# Altium footprint library Connector Header 254.PcbLib: 156 footprints (part 9 of 11)
Each footprint in its own frame and in the unit in brackets; x right, y up, seen from the top. Pads: shape width x height; smd on the part's side, far side on the other; paste and mask are expansions set on the pad; w line width, h text height; cw(c..) or ccw(c..) is an arc to the next point about the centre after c.
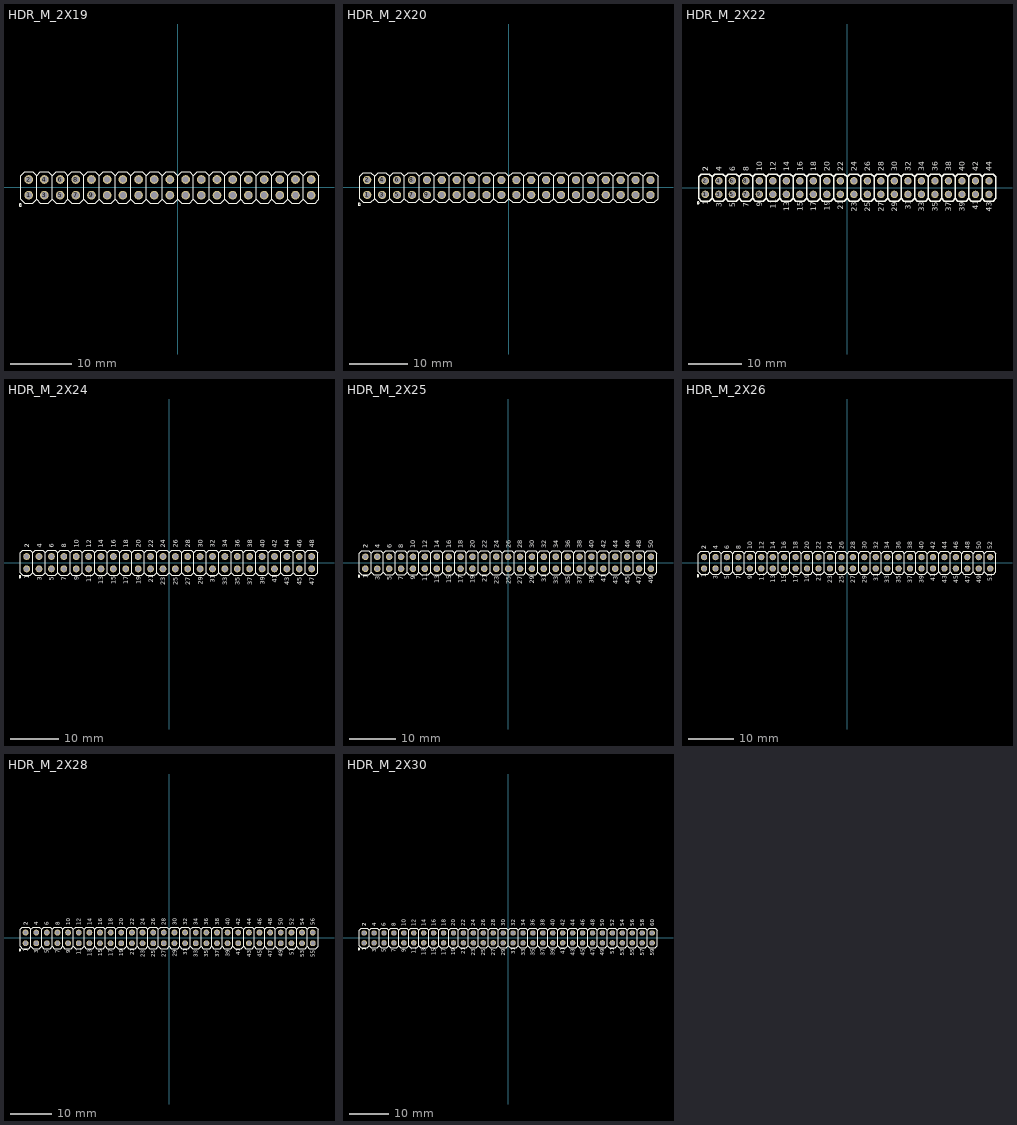
[diagram p8: the footprints below, top view; thin cyan lines are the x and y axes]

## HDR_M_2X19 [mm] "Connector; Header; 19x2 Position"
height 7.5
pads (38):
  round 1.4 / inner round 1.4 / far side oval 1.4x2.2 hole 1: 1(-24.13,-1.27) 2(-24.13,1.27) 3(-21.59,-1.27) 4(-21.59,1.27) 5(-19.05,-1.27) 6(-19.05,1.27) 7(-16.51,-1.27) 8(-16.51,1.27) 9(-13.97,-1.27) 10(-13.97,1.27) 11(-11.43,-1.27) 12(-11.43,1.27) 13(-8.89,-1.27) 14(-8.89,1.27) 15(-6.35,-1.27) 16(-6.35,1.27) 17(-3.81,-1.27) 18(-3.81,1.27) 19(-1.27,-1.27) 20(-1.27,1.27) 21(1.27,-1.27) 22(1.27,1.27) 23(3.81,-1.27) 24(3.81,1.27) 25(6.35,-1.27) 26(6.35,1.27) 27(8.89,-1.27) 28(8.89,1.27) 29(11.43,-1.27) 30(11.43,1.27) 31(13.97,-1.27) 32(13.97,1.27) 33(16.51,-1.27) 34(16.51,1.27) 35(19.05,-1.27) 36(19.05,1.27) 37(21.59,-1.27) 38(21.59,1.27)
TopOverlay:
  drawing of 173 lines, arcs and shapes, not listed
3D body "PLD-38.step": height 8.5, standoff -2.9, extent -25.4,-2.5 22.86,2.5

## HDR_M_2X20 [mm] "Connector; Header; 20x2 Position"
height 7.5
pads (40):
  round 1.4 / inner round 1.4 / far side oval 1.4x2.2 hole 1: 1(-24.13,-1.27) 2(-24.13,1.27) 3(-21.59,-1.27) 4(-21.59,1.27) 5(-19.05,-1.27) 6(-19.05,1.27) 7(-16.51,-1.27) 8(-16.51,1.27) 9(-13.97,-1.27) 10(-13.97,1.27) 11(-11.43,-1.27) 12(-11.43,1.27) 13(-8.89,-1.27) 14(-8.89,1.27) 15(-6.35,-1.27) 16(-6.35,1.27) 17(-3.81,-1.27) 18(-3.81,1.27) 19(-1.27,-1.27) 20(-1.27,1.27) 21(1.27,-1.27) 22(1.27,1.27) 23(3.81,-1.27) 24(3.81,1.27) 25(6.35,-1.27) 26(6.35,1.27) 27(8.89,-1.27) 28(8.89,1.27) 29(11.43,-1.27) 30(11.43,1.27) 31(13.97,-1.27) 32(13.97,1.27) 33(16.51,-1.27) 34(16.51,1.27) 35(19.05,-1.27) 36(19.05,1.27) 37(21.59,-1.27) 38(21.59,1.27) 39(24.13,-1.27) 40(24.13,1.27)
TopOverlay:
  drawing of 182 lines, arcs and shapes, not listed
3D body "PLD-40.step": height 8.4, standoff -3, extent -25.4,-2.5 25.4,2.5

## HDR_M_2X22 [mm] "Male Header 2X22 with 2.54 mm Pitch"
pads (44):
  round 1.4 / inner round 1.4 / far side oval 1.4x2.2 hole 1: 1(-26.67,-1.27) 2(-26.67,1.27) 3(-24.13,-1.27) 4(-24.13,1.27) 5(-21.59,-1.27) 6(-21.59,1.27) 7(-19.05,-1.27) 8(-19.05,1.27) 9(-16.51,-1.27) 10(-16.51,1.27) 11(-13.97,-1.27) 12(-13.97,1.27) 13(-11.43,-1.27) 14(-11.43,1.27) 15(-8.89,-1.27) 16(-8.89,1.27) 17(-6.35,-1.27) 18(-6.35,1.27) 19(-3.81,-1.27) 20(-3.81,1.27) 21(-1.27,-1.27) 22(-1.27,1.27) 23(1.27,-1.27) 24(1.27,1.27) 25(3.81,-1.27) 26(3.81,1.27) 27(6.35,-1.27) 28(6.35,1.27) 29(8.89,-1.27) 30(8.89,1.27) 31(11.43,-1.27) 32(11.43,1.27) 33(13.97,-1.27) 34(13.97,1.27) 35(16.51,-1.27) 36(16.51,1.27) 37(19.05,-1.27) 38(19.05,1.27) 39(21.59,-1.27) 40(21.59,1.27) 41(24.13,-1.27) 42(24.13,1.27) 43(26.67,-1.27) 44(26.67,1.27)
TopOverlay:
  drawing of 156 lines, arcs and shapes, not listed
  text "1" at -26.162,-3.253 h1
  text "2" at -26.162,3.048 h1
  text "2" at -26.162,3.048 h1
  text "1" at -26.162,-3.253 h1
  text "4" at -23.622,3.048 h1
  text "3" at -23.622,-3.682 h1
  text "6" at -21.082,3.048 h1
  text "5" at -21.082,-3.682 h1
  text "8" at -18.542,3.048 h1
  text "7" at -18.542,-3.682 h1
  text "10" at -16.002,3.048 h1
  text "9" at -16.002,-3.634 h1
  text "12" at -13.462,3.048 h1
  text "11" at -13.462,-3.986 h1
  text "14" at -10.922,3.048 h1
  text "13" at -10.922,-4.415 h1
  text "16" at -8.382,3.048 h1
  text "15" at -8.382,-4.415 h1
  text "18" at -5.842,3.048 h1
  text "17" at -5.842,-4.415 h1
  text "20" at -3.302,3.048 h1
  text "19" at -3.302,-4.367 h1
  text "22" at -0.762,3.048 h1
  text "21" at -0.762,-4.144 h1
  text "24" at 1.778,3.048 h1
  text "23" at 1.778,-4.572 h1
  text "26" at 4.318,3.048 h1
  text "25" at 4.318,-4.572 h1
  text "28" at 6.858,3.048 h1
  text "27" at 6.858,-4.572 h1
  text "30" at 9.398,3.048 h1
  text "29" at 9.398,-4.524 h1
  text "32" at 11.938,3.048 h1
  text "31" at 11.938,-4.144 h1
  text "34" at 14.478,3.048 h1
  text "33" at 14.478,-4.572 h1
  text "36" at 17.018,3.048 h1
  text "35" at 17.018,-4.572 h1
  text "38" at 19.558,3.048 h1
  text "37" at 19.558,-4.572 h1
  text "40" at 22.098,3.048 h1
  text "39" at 22.098,-4.524 h1
  text "42" at 24.638,3.048 h1
  text "41" at 24.638,-4.144 h1
  text "44" at 27.178,3.048 h1
  text "43" at 27.178,-4.572 h1
3D body "PIN.STEP": height 8.43, standoff -2.49, extent -27.94,-2.54 -25.4,0
3D body "PIN_mid.STEP": height 8.43, standoff -2.49, extent -22.86,0 -20.32,2.54
3D body "PIN_mid.STEP": height 8.43, standoff -2.49, extent -20.32,0 -17.78,2.54
3D body "PIN_mid.STEP": height 8.43, standoff -2.49, extent -17.78,0 -15.24,2.54
3D body "PIN_mid.STEP": height 8.43, standoff -2.49, extent -15.24,0 -12.7,2.54
3D body "PIN_mid.STEP": height 8.43, standoff -2.49, extent -12.7,0 -10.16,2.54
3D body "PIN_mid.STEP": height 8.43, standoff -2.49, extent -10.16,0 -7.62,2.54
3D body "PIN_mid.STEP": height 8.43, standoff -2.49, extent -7.62,0 -5.08,2.54
3D body "PIN_mid.STEP": height 8.43, standoff -2.49, extent -5.08,0 -2.54,2.54
3D body "PIN_mid.STEP": height 8.43, standoff -2.49, extent -2.54,0 0,2.54
3D body "PIN_mid.STEP": height 8.43, standoff -2.49, extent 0,0 2.54,2.54
3D body "PIN_mid.STEP": height 8.43, standoff -2.49, extent 2.54,0 5.08,2.54
3D body "PIN_mid.STEP": height 8.43, standoff -2.49, extent 5.08,0 7.62,2.54
3D body "PIN_mid.STEP": height 8.43, standoff -2.49, extent 7.62,0 10.16,2.54
3D body "PIN_mid.STEP": height 8.43, standoff -2.49, extent 10.16,0 12.7,2.54
3D body "PIN_mid.STEP": height 8.43, standoff -2.49, extent 12.7,0 15.24,2.54
3D body "PIN_mid.STEP": height 8.43, standoff -2.49, extent 15.24,0 17.78,2.54
3D body "PIN_mid.STEP": height 8.43, standoff -2.49, extent 17.78,0 20.32,2.54
3D body "PIN_mid.STEP": height 8.43, standoff -2.49, extent 20.32,0 22.86,2.54
3D body "PIN_mid.STEP": height 8.43, standoff -2.49, extent 22.86,0 25.4,2.54
3D body "PIN_mid.STEP": height 8.43, standoff -2.49, extent -25.4,0 -22.86,2.54
3D body "PIN_mid.STEP": height 8.43, standoff -2.49, extent -25.4,-2.54 -22.86,0
3D body "PIN_mid.STEP": height 8.43, standoff -2.49, extent -22.86,-2.54 -20.32,0
3D body "PIN_mid.STEP": height 8.43, standoff -2.49, extent -20.32,-2.54 -17.78,0
3D body "PIN_mid.STEP": height 8.43, standoff -2.49, extent -17.78,-2.54 -15.24,0
3D body "PIN_mid.STEP": height 8.43, standoff -2.49, extent -15.24,-2.54 -12.7,0
3D body "PIN_mid.STEP": height 8.43, standoff -2.49, extent -12.7,-2.54 -10.16,0
3D body "PIN_mid.STEP": height 8.43, standoff -2.49, extent -10.16,-2.54 -7.62,0
3D body "PIN_mid.STEP": height 8.43, standoff -2.49, extent -7.62,-2.54 -5.08,0
3D body "PIN_mid.STEP": height 8.43, standoff -2.49, extent -5.08,-2.54 -2.54,0
3D body "PIN_mid.STEP": height 8.43, standoff -2.49, extent -2.54,-2.54 0,0
3D body "PIN_mid.STEP": height 8.43, standoff -2.49, extent 0,-2.54 2.54,0
3D body "PIN_mid.STEP": height 8.43, standoff -2.49, extent 2.54,-2.54 5.08,0
3D body "PIN_mid.STEP": height 8.43, standoff -2.49, extent 5.08,-2.54 7.62,0
3D body "PIN_mid.STEP": height 8.43, standoff -2.49, extent 7.62,-2.54 10.16,0
3D body "PIN_mid.STEP": height 8.43, standoff -2.49, extent 10.16,-2.54 12.7,0
3D body "PIN_mid.STEP": height 8.43, standoff -2.49, extent 12.7,-2.54 15.24,0
3D body "PIN_mid.STEP": height 8.43, standoff -2.49, extent 15.24,-2.54 17.78,0
3D body "PIN_mid.STEP": height 8.43, standoff -2.49, extent 17.78,-2.54 20.32,0
3D body "PIN_mid.STEP": height 8.43, standoff -2.49, extent 20.32,-2.54 22.86,0
3D body "PIN_mid.STEP": height 8.43, standoff -2.49, extent 22.86,-2.54 25.4,0
3D body "PIN.STEP": height 8.43, standoff -2.49, extent -27.94,0 -25.4,2.54
3D body "PIN.STEP": height 8.43, standoff -2.49, extent 25.4,0 27.94,2.54
3D body "PIN.STEP": height 8.43, standoff -2.49, extent 25.4,-2.54 27.94,0

## HDR_M_2X24 [mm] "Male Header 2X24 with 2.54 mm Pitch"
pads (48):
  round 1.4 / inner round 1.4 / far side oval 1.4x2.2 hole 1: 1(-29.21,-1.27) 2(-29.21,1.27) 3(-26.67,-1.27) 4(-26.67,1.27) 5(-24.13,-1.27) 6(-24.13,1.27) 7(-21.59,-1.27) 8(-21.59,1.27) 9(-19.05,-1.27) 10(-19.05,1.27) 11(-16.51,-1.27) 12(-16.51,1.27) 13(-13.97,-1.27) 14(-13.97,1.27) 15(-11.43,-1.27) 16(-11.43,1.27) 17(-8.89,-1.27) 18(-8.89,1.27) 19(-6.35,-1.27) 20(-6.35,1.27) 21(-3.81,-1.27) 22(-3.81,1.27) 23(-1.27,-1.27) 24(-1.27,1.27) 25(1.27,-1.27) 26(1.27,1.27) 27(3.81,-1.27) 28(3.81,1.27) 29(6.35,-1.27) 30(6.35,1.27) 31(8.89,-1.27) 32(8.89,1.27) 33(11.43,-1.27) 34(11.43,1.27) 35(13.97,-1.27) 36(13.97,1.27) 37(16.51,-1.27) 38(16.51,1.27) 39(19.05,-1.27) 40(19.05,1.27) 41(21.59,-1.27) 42(21.59,1.27) 43(24.13,-1.27) 44(24.13,1.27) 45(26.67,-1.27) 46(26.67,1.27) 47(29.21,-1.27) 48(29.21,1.27)
TopOverlay:
  drawing of 170 lines, arcs and shapes, not listed
  text "47" at 29.718,-4.572 h1
  text "48" at 29.718,3.048 h1
  text "45" at 27.178,-4.572 h1
  text "46" at 27.178,3.048 h1
  text "43" at 24.638,-4.572 h1
  text "44" at 24.638,3.048 h1
  text "41" at 22.098,-4.144 h1
  text "42" at 22.098,3.048 h1
  text "39" at 19.558,-4.524 h1
  text "40" at 19.558,3.048 h1
  text "37" at 17.018,-4.572 h1
  text "38" at 17.018,3.048 h1
  text "35" at 14.478,-4.572 h1
  text "36" at 14.478,3.048 h1
  text "33" at 11.938,-4.572 h1
  text "34" at 11.938,3.048 h1
  text "31" at 9.398,-4.144 h1
  text "32" at 9.398,3.048 h1
  text "29" at 6.858,-4.524 h1
  text "30" at 6.858,3.048 h1
  text "27" at 4.318,-4.572 h1
  text "28" at 4.318,3.048 h1
  text "25" at 1.778,-4.572 h1
  text "26" at 1.778,3.048 h1
  text "23" at -0.762,-4.572 h1
  text "24" at -0.762,3.048 h1
  text "21" at -3.302,-4.144 h1
  text "22" at -3.302,3.048 h1
  text "19" at -5.842,-4.367 h1
  text "20" at -5.842,3.048 h1
  text "17" at -8.382,-4.415 h1
  text "18" at -8.382,3.048 h1
  text "15" at -10.922,-4.415 h1
  text "16" at -10.922,3.048 h1
  text "13" at -13.462,-4.415 h1
  text "14" at -13.462,3.048 h1
  text "11" at -16.002,-3.986 h1
  text "12" at -16.002,3.048 h1
  text "9" at -18.542,-3.634 h1
  text "10" at -18.542,3.048 h1
  text "7" at -21.082,-3.682 h1
  text "8" at -21.082,3.048 h1
  text "5" at -23.622,-3.682 h1
  text "6" at -23.622,3.048 h1
  text "3" at -26.162,-3.682 h1
  text "4" at -26.162,3.048 h1
  text "1" at -28.702,-3.253 h1
  text "2" at -28.702,3.048 h1
  text "2" at -28.702,3.048 h1
  text "1" at -28.702,-3.253 h1
3D body "PIN.STEP": height 8.43, standoff -2.49, extent -30.48,-2.54 -27.94,0
3D body "PIN_mid.STEP": height 8.43, standoff -2.49, extent -25.4,0 -22.86,2.54
3D body "PIN_mid.STEP": height 8.43, standoff -2.49, extent -22.86,0 -20.32,2.54
3D body "PIN_mid.STEP": height 8.43, standoff -2.49, extent -20.32,0 -17.78,2.54
3D body "PIN_mid.STEP": height 8.43, standoff -2.49, extent -17.78,0 -15.24,2.54
3D body "PIN_mid.STEP": height 8.43, standoff -2.49, extent -15.24,0 -12.7,2.54
3D body "PIN_mid.STEP": height 8.43, standoff -2.49, extent -12.7,0 -10.16,2.54
3D body "PIN_mid.STEP": height 8.43, standoff -2.49, extent -10.16,0 -7.62,2.54
3D body "PIN_mid.STEP": height 8.43, standoff -2.49, extent -7.62,0 -5.08,2.54
3D body "PIN_mid.STEP": height 8.43, standoff -2.49, extent -5.08,0 -2.54,2.54
3D body "PIN_mid.STEP": height 8.43, standoff -2.49, extent -2.54,0 0,2.54
3D body "PIN_mid.STEP": height 8.43, standoff -2.49, extent 0,0 2.54,2.54
3D body "PIN_mid.STEP": height 8.43, standoff -2.49, extent 2.54,0 5.08,2.54
3D body "PIN_mid.STEP": height 8.43, standoff -2.49, extent 5.08,0 7.62,2.54
3D body "PIN_mid.STEP": height 8.43, standoff -2.49, extent 7.62,0 10.16,2.54
3D body "PIN_mid.STEP": height 8.43, standoff -2.49, extent 10.16,0 12.7,2.54
3D body "PIN_mid.STEP": height 8.43, standoff -2.49, extent 12.7,0 15.24,2.54
3D body "PIN_mid.STEP": height 8.43, standoff -2.49, extent 15.24,0 17.78,2.54
3D body "PIN_mid.STEP": height 8.43, standoff -2.49, extent 17.78,0 20.32,2.54
3D body "PIN_mid.STEP": height 8.43, standoff -2.49, extent 20.32,0 22.86,2.54
3D body "PIN_mid.STEP": height 8.43, standoff -2.49, extent 22.86,0 25.4,2.54
3D body "PIN_mid.STEP": height 8.43, standoff -2.49, extent 25.4,0 27.94,2.54
3D body "PIN_mid.STEP": height 8.43, standoff -2.49, extent -27.94,0 -25.4,2.54
3D body "PIN_mid.STEP": height 8.43, standoff -2.49, extent -27.94,-2.54 -25.4,0
3D body "PIN_mid.STEP": height 8.43, standoff -2.49, extent -25.4,-2.54 -22.86,0
3D body "PIN_mid.STEP": height 8.43, standoff -2.49, extent -22.86,-2.54 -20.32,0
3D body "PIN_mid.STEP": height 8.43, standoff -2.49, extent -20.32,-2.54 -17.78,0
3D body "PIN_mid.STEP": height 8.43, standoff -2.49, extent -17.78,-2.54 -15.24,0
3D body "PIN_mid.STEP": height 8.43, standoff -2.49, extent -15.24,-2.54 -12.7,0
3D body "PIN_mid.STEP": height 8.43, standoff -2.49, extent -12.7,-2.54 -10.16,0
3D body "PIN_mid.STEP": height 8.43, standoff -2.49, extent -10.16,-2.54 -7.62,0
3D body "PIN_mid.STEP": height 8.43, standoff -2.49, extent -7.62,-2.54 -5.08,0
3D body "PIN_mid.STEP": height 8.43, standoff -2.49, extent -5.08,-2.54 -2.54,0
3D body "PIN_mid.STEP": height 8.43, standoff -2.49, extent -2.54,-2.54 0,0
3D body "PIN_mid.STEP": height 8.43, standoff -2.49, extent 0,-2.54 2.54,0
3D body "PIN_mid.STEP": height 8.43, standoff -2.49, extent 2.54,-2.54 5.08,0
3D body "PIN_mid.STEP": height 8.43, standoff -2.49, extent 5.08,-2.54 7.62,0
3D body "PIN_mid.STEP": height 8.43, standoff -2.49, extent 7.62,-2.54 10.16,0
3D body "PIN_mid.STEP": height 8.43, standoff -2.49, extent 10.16,-2.54 12.7,0
3D body "PIN_mid.STEP": height 8.43, standoff -2.49, extent 12.7,-2.54 15.24,0
3D body "PIN_mid.STEP": height 8.43, standoff -2.49, extent 15.24,-2.54 17.78,0
3D body "PIN_mid.STEP": height 8.43, standoff -2.49, extent 17.78,-2.54 20.32,0
3D body "PIN_mid.STEP": height 8.43, standoff -2.49, extent 20.32,-2.54 22.86,0
3D body "PIN_mid.STEP": height 8.43, standoff -2.49, extent 22.86,-2.54 25.4,0
3D body "PIN_mid.STEP": height 8.43, standoff -2.49, extent 25.4,-2.54 27.94,0
3D body "PIN.STEP": height 8.43, standoff -2.49, extent -30.48,0 -27.94,2.54
3D body "PIN.STEP": height 8.43, standoff -2.49, extent 27.94,0 30.48,2.54
3D body "PIN.STEP": height 8.43, standoff -2.49, extent 27.94,-2.54 30.48,0

## HDR_M_2X25 [mm] "Male Header 2X25 with 2.54 mm Pitch"
pads (50):
  round 1.4 / inner round 1.4 / far side oval 1.4x2.2 hole 1: 1(-30.48,-1.27) 2(-30.48,1.27) 3(-27.94,-1.27) 4(-27.94,1.27) 5(-25.4,-1.27) 6(-25.4,1.27) 7(-22.86,-1.27) 8(-22.86,1.27) 9(-20.32,-1.27) 10(-20.32,1.27) 11(-17.78,-1.27) 12(-17.78,1.27) 13(-15.24,-1.27) 14(-15.24,1.27) 15(-12.7,-1.27) 16(-12.7,1.27) 17(-10.16,-1.27) 18(-10.16,1.27) 19(-7.62,-1.27) 20(-7.62,1.27) 21(-5.08,-1.27) 22(-5.08,1.27) 23(-2.54,-1.27) 24(-2.54,1.27) 25(0,-1.27) 26(0,1.27) 27(2.54,-1.27) 28(2.54,1.27) 29(5.08,-1.27) 30(5.08,1.27) 31(7.62,-1.27) 32(7.62,1.27) 33(10.16,-1.27) 34(10.16,1.27) 35(12.7,-1.27) 36(12.7,1.27) 37(15.24,-1.27) 38(15.24,1.27) 39(17.78,-1.27) 40(17.78,1.27) 41(20.32,-1.27) 42(20.32,1.27) 43(22.86,-1.27) 44(22.86,1.27) 45(25.4,-1.27) 46(25.4,1.27) 47(27.94,-1.27) 48(27.94,1.27) 49(30.48,-1.27) 50(30.48,1.27)
TopOverlay:
  drawing of 177 lines, arcs and shapes, not listed
  text "1" at -29.972,-3.253 h1
  text "2" at -29.972,3.048 h1
  text "2" at -29.972,3.048 h1
  text "1" at -29.972,-3.253 h1
  text "4" at -27.432,3.048 h1
  text "3" at -27.432,-3.682 h1
  text "6" at -24.892,3.048 h1
  text "5" at -24.892,-3.682 h1
  text "8" at -22.352,3.048 h1
  text "7" at -22.352,-3.682 h1
  text "10" at -19.812,3.048 h1
  text "9" at -19.812,-3.634 h1
  text "12" at -17.272,3.048 h1
  text "11" at -17.272,-3.986 h1
  text "14" at -14.732,3.048 h1
  text "13" at -14.732,-4.415 h1
  text "16" at -12.192,3.048 h1
  text "15" at -12.192,-4.415 h1
  text "18" at -9.652,3.048 h1
  text "17" at -9.652,-4.415 h1
  text "20" at -7.112,3.048 h1
  text "19" at -7.112,-4.367 h1
  text "22" at -4.572,3.048 h1
  text "21" at -4.572,-4.144 h1
  text "24" at -2.032,3.048 h1
  text "23" at -2.032,-4.572 h1
  text "26" at 0.508,3.048 h1
  text "25" at 0.508,-4.572 h1
  text "28" at 3.048,3.048 h1
  text "27" at 3.048,-4.572 h1
  text "30" at 5.588,3.048 h1
  text "29" at 5.588,-4.524 h1
  text "32" at 8.128,3.048 h1
  text "31" at 8.128,-4.144 h1
  text "34" at 10.668,3.048 h1
  text "33" at 10.668,-4.572 h1
  text "36" at 13.208,3.048 h1
  text "35" at 13.208,-4.572 h1
  text "38" at 15.748,3.048 h1
  text "37" at 15.748,-4.572 h1
  text "40" at 18.288,3.048 h1
  text "39" at 18.288,-4.524 h1
  text "42" at 20.828,3.048 h1
  text "41" at 20.828,-4.144 h1
  text "44" at 23.368,3.048 h1
  text "43" at 23.368,-4.572 h1
  text "46" at 25.908,3.048 h1
  text "45" at 25.908,-4.572 h1
  text "48" at 28.448,3.048 h1
  text "47" at 28.448,-4.572 h1
  text "50" at 30.988,3.048 h1
  text "49" at 30.988,-4.524 h1
3D body "PIN.STEP": height 8.43, standoff -2.49, extent 29.21,-2.54 31.75,0
3D body "PIN.STEP": height 8.43, standoff -2.49, extent 29.21,0 31.75,2.54
3D body "PIN.STEP": height 8.43, standoff -2.49, extent -31.75,0 -29.21,2.54
3D body "PIN_mid.STEP": height 8.43, standoff -2.49, extent 26.67,-2.54 29.21,0
3D body "PIN_mid.STEP": height 8.43, standoff -2.49, extent 24.13,-2.54 26.67,0
3D body "PIN_mid.STEP": height 8.43, standoff -2.49, extent 21.59,-2.54 24.13,0
3D body "PIN_mid.STEP": height 8.43, standoff -2.49, extent 19.05,-2.54 21.59,0
3D body "PIN_mid.STEP": height 8.43, standoff -2.49, extent 16.51,-2.54 19.05,0
3D body "PIN_mid.STEP": height 8.43, standoff -2.49, extent 13.97,-2.54 16.51,0
3D body "PIN_mid.STEP": height 8.43, standoff -2.49, extent 11.43,-2.54 13.97,0
3D body "PIN_mid.STEP": height 8.43, standoff -2.49, extent 8.89,-2.54 11.43,0
3D body "PIN_mid.STEP": height 8.43, standoff -2.49, extent 6.35,-2.54 8.89,0
3D body "PIN_mid.STEP": height 8.43, standoff -2.49, extent 3.81,-2.54 6.35,0
3D body "PIN_mid.STEP": height 8.43, standoff -2.49, extent 1.27,-2.54 3.81,0
3D body "PIN_mid.STEP": height 8.43, standoff -2.49, extent -1.27,-2.54 1.27,0
3D body "PIN_mid.STEP": height 8.43, standoff -2.49, extent -3.81,-2.54 -1.27,0
3D body "PIN_mid.STEP": height 8.43, standoff -2.49, extent -6.35,-2.54 -3.81,0
3D body "PIN_mid.STEP": height 8.43, standoff -2.49, extent -8.89,-2.54 -6.35,0
3D body "PIN_mid.STEP": height 8.43, standoff -2.49, extent -11.43,-2.54 -8.89,0
3D body "PIN_mid.STEP": height 8.43, standoff -2.49, extent -13.97,-2.54 -11.43,0
3D body "PIN_mid.STEP": height 8.43, standoff -2.49, extent -16.51,-2.54 -13.97,0
3D body "PIN_mid.STEP": height 8.43, standoff -2.49, extent -19.05,-2.54 -16.51,0
3D body "PIN_mid.STEP": height 8.43, standoff -2.49, extent -21.59,-2.54 -19.05,0
3D body "PIN_mid.STEP": height 8.43, standoff -2.49, extent -24.13,-2.54 -21.59,0
3D body "PIN_mid.STEP": height 8.43, standoff -2.49, extent -26.67,-2.54 -24.13,0
3D body "PIN_mid.STEP": height 8.43, standoff -2.49, extent -29.21,-2.54 -26.67,0
3D body "PIN_mid.STEP": height 8.43, standoff -2.49, extent -29.21,0 -26.67,2.54
3D body "PIN_mid.STEP": height 8.43, standoff -2.49, extent 26.67,0 29.21,2.54
3D body "PIN_mid.STEP": height 8.43, standoff -2.49, extent 24.13,0 26.67,2.54
3D body "PIN_mid.STEP": height 8.43, standoff -2.49, extent 21.59,0 24.13,2.54
3D body "PIN_mid.STEP": height 8.43, standoff -2.49, extent 19.05,0 21.59,2.54
3D body "PIN_mid.STEP": height 8.43, standoff -2.49, extent 16.51,0 19.05,2.54
3D body "PIN_mid.STEP": height 8.43, standoff -2.49, extent 13.97,0 16.51,2.54
3D body "PIN_mid.STEP": height 8.43, standoff -2.49, extent 11.43,0 13.97,2.54
3D body "PIN_mid.STEP": height 8.43, standoff -2.49, extent 8.89,0 11.43,2.54
3D body "PIN_mid.STEP": height 8.43, standoff -2.49, extent 6.35,0 8.89,2.54
3D body "PIN_mid.STEP": height 8.43, standoff -2.49, extent 3.81,0 6.35,2.54
3D body "PIN_mid.STEP": height 8.43, standoff -2.49, extent 1.27,0 3.81,2.54
3D body "PIN_mid.STEP": height 8.43, standoff -2.49, extent -1.27,0 1.27,2.54
3D body "PIN_mid.STEP": height 8.43, standoff -2.49, extent -3.81,0 -1.27,2.54
3D body "PIN_mid.STEP": height 8.43, standoff -2.49, extent -6.35,0 -3.81,2.54
3D body "PIN_mid.STEP": height 8.43, standoff -2.49, extent -8.89,0 -6.35,2.54
3D body "PIN_mid.STEP": height 8.43, standoff -2.49, extent -11.43,0 -8.89,2.54
3D body "PIN_mid.STEP": height 8.43, standoff -2.49, extent -13.97,0 -11.43,2.54
3D body "PIN_mid.STEP": height 8.43, standoff -2.49, extent -16.51,0 -13.97,2.54
3D body "PIN_mid.STEP": height 8.43, standoff -2.49, extent -19.05,0 -16.51,2.54
3D body "PIN_mid.STEP": height 8.43, standoff -2.49, extent -21.59,0 -19.05,2.54
3D body "PIN_mid.STEP": height 8.43, standoff -2.49, extent -24.13,0 -21.59,2.54
3D body "PIN_mid.STEP": height 8.43, standoff -2.49, extent -26.67,0 -24.13,2.54
3D body "PIN.STEP": height 8.43, standoff -2.49, extent -31.75,-2.54 -29.21,0

## HDR_M_2X26 [mm] "Male Header 2X26 with 2.54 mm Pitch"
pads (52):
  round 1.4 / inner round 1.4 / far side oval 1.4x2.2 hole 1: 1(-31.75,-1.27) 2(-31.75,1.27) 3(-29.21,-1.27) 4(-29.21,1.27) 5(-26.67,-1.27) 6(-26.67,1.27) 7(-24.13,-1.27) 8(-24.13,1.27) 9(-21.59,-1.27) 10(-21.59,1.27) 11(-19.05,-1.27) 12(-19.05,1.27) 13(-16.51,-1.27) 14(-16.51,1.27) 15(-13.97,-1.27) 16(-13.97,1.27) 17(-11.43,-1.27) 18(-11.43,1.27) 19(-8.89,-1.27) 20(-8.89,1.27) 21(-6.35,-1.27) 22(-6.35,1.27) 23(-3.81,-1.27) 24(-3.81,1.27) 25(-1.27,-1.27) 26(-1.27,1.27) 27(1.27,-1.27) 28(1.27,1.27) 29(3.81,-1.27) 30(3.81,1.27) 31(6.35,-1.27) 32(6.35,1.27) 33(8.89,-1.27) 34(8.89,1.27) 35(11.43,-1.27) 36(11.43,1.27) 37(13.97,-1.27) 38(13.97,1.27) 39(16.51,-1.27) 40(16.51,1.27) 41(19.05,-1.27) 42(19.05,1.27) 43(21.59,-1.27) 44(21.59,1.27) 45(24.13,-1.27) 46(24.13,1.27) 47(26.67,-1.27) 48(26.67,1.27) 49(29.21,-1.27) 50(29.21,1.27) 51(31.75,-1.27) 52(31.75,1.27)
TopOverlay:
  drawing of 184 lines, arcs and shapes, not listed
  text "51" at 32.258,-4.144 h1
  text "52" at 32.258,3.048 h1
  text "49" at 29.718,-4.524 h1
  text "50" at 29.718,3.048 h1
  text "47" at 27.178,-4.572 h1
  text "48" at 27.178,3.048 h1
  text "45" at 24.638,-4.572 h1
  text "46" at 24.638,3.048 h1
  text "43" at 22.098,-4.572 h1
  text "44" at 22.098,3.048 h1
  text "41" at 19.558,-4.144 h1
  text "42" at 19.558,3.048 h1
  text "39" at 17.018,-4.524 h1
  text "40" at 17.018,3.048 h1
  text "37" at 14.478,-4.572 h1
  text "38" at 14.478,3.048 h1
  text "35" at 11.938,-4.572 h1
  text "36" at 11.938,3.048 h1
  text "33" at 9.398,-4.572 h1
  text "34" at 9.398,3.048 h1
  text "31" at 6.858,-4.144 h1
  text "32" at 6.858,3.048 h1
  text "29" at 4.318,-4.524 h1
  text "30" at 4.318,3.048 h1
  text "27" at 1.778,-4.572 h1
  text "28" at 1.778,3.048 h1
  text "25" at -0.762,-4.572 h1
  text "26" at -0.762,3.048 h1
  text "23" at -3.302,-4.572 h1
  text "24" at -3.302,3.048 h1
  text "21" at -5.842,-4.144 h1
  text "22" at -5.842,3.048 h1
  text "19" at -8.382,-4.367 h1
  text "20" at -8.382,3.048 h1
  text "17" at -10.922,-4.415 h1
  text "18" at -10.922,3.048 h1
  text "15" at -13.462,-4.415 h1
  text "16" at -13.462,3.048 h1
  text "13" at -16.002,-4.415 h1
  text "14" at -16.002,3.048 h1
  text "11" at -18.542,-3.986 h1
  text "12" at -18.542,3.048 h1
  text "9" at -21.082,-3.634 h1
  text "10" at -21.082,3.048 h1
  text "7" at -23.622,-3.682 h1
  text "8" at -23.622,3.048 h1
  text "5" at -26.162,-3.682 h1
  text "6" at -26.162,3.048 h1
  text "3" at -28.702,-3.682 h1
  text "4" at -28.702,3.048 h1
  text "1" at -31.242,-3.253 h1
  text "2" at -31.242,3.048 h1
  text "2" at -31.242,3.048 h1
  text "1" at -31.242,-3.253 h1
3D body "PIN.STEP": height 8.43, standoff -2.49, extent 30.48,-2.54 33.02,0
3D body "PIN.STEP": height 8.43, standoff -2.49, extent 30.48,0 33.02,2.54
3D body "PIN.STEP": height 8.43, standoff -2.49, extent -33.02,0 -30.48,2.54
3D body "PIN_mid.STEP": height 8.43, standoff -2.49, extent 27.94,-2.54 30.48,0
3D body "PIN_mid.STEP": height 8.43, standoff -2.49, extent 25.4,-2.54 27.94,0
3D body "PIN_mid.STEP": height 8.43, standoff -2.49, extent 22.86,-2.54 25.4,0
3D body "PIN_mid.STEP": height 8.43, standoff -2.49, extent 20.32,-2.54 22.86,0
3D body "PIN_mid.STEP": height 8.43, standoff -2.49, extent 17.78,-2.54 20.32,0
3D body "PIN_mid.STEP": height 8.43, standoff -2.49, extent 15.24,-2.54 17.78,0
3D body "PIN_mid.STEP": height 8.43, standoff -2.49, extent 12.7,-2.54 15.24,0
3D body "PIN_mid.STEP": height 8.43, standoff -2.49, extent 10.16,-2.54 12.7,0
3D body "PIN_mid.STEP": height 8.43, standoff -2.49, extent 7.62,-2.54 10.16,0
3D body "PIN_mid.STEP": height 8.43, standoff -2.49, extent 5.08,-2.54 7.62,0
3D body "PIN_mid.STEP": height 8.43, standoff -2.49, extent 2.54,-2.54 5.08,0
3D body "PIN_mid.STEP": height 8.43, standoff -2.49, extent 0,-2.54 2.54,0
3D body "PIN_mid.STEP": height 8.43, standoff -2.49, extent -2.54,-2.54 0,0
3D body "PIN_mid.STEP": height 8.43, standoff -2.49, extent -5.08,-2.54 -2.54,0
3D body "PIN_mid.STEP": height 8.43, standoff -2.49, extent -7.62,-2.54 -5.08,0
3D body "PIN_mid.STEP": height 8.43, standoff -2.49, extent -10.16,-2.54 -7.62,0
3D body "PIN_mid.STEP": height 8.43, standoff -2.49, extent -12.7,-2.54 -10.16,0
3D body "PIN_mid.STEP": height 8.43, standoff -2.49, extent -15.24,-2.54 -12.7,0
3D body "PIN_mid.STEP": height 8.43, standoff -2.49, extent -17.78,-2.54 -15.24,0
3D body "PIN_mid.STEP": height 8.43, standoff -2.49, extent -20.32,-2.54 -17.78,0
3D body "PIN_mid.STEP": height 8.43, standoff -2.49, extent -22.86,-2.54 -20.32,0
3D body "PIN_mid.STEP": height 8.43, standoff -2.49, extent -25.4,-2.54 -22.86,0
3D body "PIN_mid.STEP": height 8.43, standoff -2.49, extent -27.94,-2.54 -25.4,0
3D body "PIN_mid.STEP": height 8.43, standoff -2.49, extent -30.48,-2.54 -27.94,0
3D body "PIN_mid.STEP": height 8.43, standoff -2.49, extent -30.48,0 -27.94,2.54
3D body "PIN_mid.STEP": height 8.43, standoff -2.49, extent 27.94,0 30.48,2.54
3D body "PIN_mid.STEP": height 8.43, standoff -2.49, extent 25.4,0 27.94,2.54
3D body "PIN_mid.STEP": height 8.43, standoff -2.49, extent 22.86,0 25.4,2.54
3D body "PIN_mid.STEP": height 8.43, standoff -2.49, extent 20.32,0 22.86,2.54
3D body "PIN_mid.STEP": height 8.43, standoff -2.49, extent 17.78,0 20.32,2.54
3D body "PIN_mid.STEP": height 8.43, standoff -2.49, extent 15.24,0 17.78,2.54
3D body "PIN_mid.STEP": height 8.43, standoff -2.49, extent 12.7,0 15.24,2.54
3D body "PIN_mid.STEP": height 8.43, standoff -2.49, extent 10.16,0 12.7,2.54
3D body "PIN_mid.STEP": height 8.43, standoff -2.49, extent 7.62,0 10.16,2.54
3D body "PIN_mid.STEP": height 8.43, standoff -2.49, extent 5.08,0 7.62,2.54
3D body "PIN_mid.STEP": height 8.43, standoff -2.49, extent 2.54,0 5.08,2.54
3D body "PIN_mid.STEP": height 8.43, standoff -2.49, extent 0,0 2.54,2.54
3D body "PIN_mid.STEP": height 8.43, standoff -2.49, extent -2.54,0 0,2.54
3D body "PIN_mid.STEP": height 8.43, standoff -2.49, extent -5.08,0 -2.54,2.54
3D body "PIN_mid.STEP": height 8.43, standoff -2.49, extent -7.62,0 -5.08,2.54
3D body "PIN_mid.STEP": height 8.43, standoff -2.49, extent -10.16,0 -7.62,2.54
3D body "PIN_mid.STEP": height 8.43, standoff -2.49, extent -12.7,0 -10.16,2.54
3D body "PIN_mid.STEP": height 8.43, standoff -2.49, extent -15.24,0 -12.7,2.54
3D body "PIN_mid.STEP": height 8.43, standoff -2.49, extent -17.78,0 -15.24,2.54
3D body "PIN_mid.STEP": height 8.43, standoff -2.49, extent -20.32,0 -17.78,2.54
3D body "PIN_mid.STEP": height 8.43, standoff -2.49, extent -22.86,0 -20.32,2.54
3D body "PIN_mid.STEP": height 8.43, standoff -2.49, extent -25.4,0 -22.86,2.54
3D body "PIN_mid.STEP": height 8.43, standoff -2.49, extent -27.94,0 -25.4,2.54
3D body "PIN.STEP": height 8.43, standoff -2.49, extent -33.02,-2.54 -30.48,0

## HDR_M_2X28 [mm] "Male Header 2X28 with 2.54 mm Pitch"
pads (56):
  round 1.4 / inner round 1.4 / far side oval 1.4x2.2 hole 1: 1(-34.29,-1.27) 2(-34.29,1.27) 3(-31.75,-1.27) 4(-31.75,1.27) 5(-29.21,-1.27) 6(-29.21,1.27) 7(-26.67,-1.27) 8(-26.67,1.27) 9(-24.13,-1.27) 10(-24.13,1.27) 11(-21.59,-1.27) 12(-21.59,1.27) 13(-19.05,-1.27) 14(-19.05,1.27) 15(-16.51,-1.27) 16(-16.51,1.27) 17(-13.97,-1.27) 18(-13.97,1.27) 19(-11.43,-1.27) 20(-11.43,1.27) 21(-8.89,-1.27) 22(-8.89,1.27) 23(-6.35,-1.27) 24(-6.35,1.27) 25(-3.81,-1.27) 26(-3.81,1.27) 27(-1.27,-1.27) 28(-1.27,1.27) 29(1.27,-1.27) 30(1.27,1.27) 31(3.81,-1.27) 32(3.81,1.27) 33(6.35,-1.27) 34(6.35,1.27) 35(8.89,-1.27) 36(8.89,1.27) 37(11.43,-1.27) 38(11.43,1.27) 39(13.97,-1.27) 40(13.97,1.27) 41(16.51,-1.27) 42(16.51,1.27) 43(19.05,-1.27) 44(19.05,1.27) 45(21.59,-1.27) 46(21.59,1.27) 47(24.13,-1.27) 48(24.13,1.27) 49(26.67,-1.27) 50(26.67,1.27) 51(29.21,-1.27) 52(29.21,1.27) 53(31.75,-1.27) 54(31.75,1.27) 55(34.29,-1.27) 56(34.29,1.27)
TopOverlay:
  drawing of 198 lines, arcs and shapes, not listed
  text "55" at 34.798,-4.572 h1
  text "56" at 34.798,3.048 h1
  text "53" at 32.258,-4.572 h1
  text "54" at 32.258,3.048 h1
  text "51" at 29.718,-4.144 h1
  text "52" at 29.718,3.048 h1
  text "49" at 27.178,-4.524 h1
  text "50" at 27.178,3.048 h1
  text "47" at 24.638,-4.572 h1
  text "48" at 24.638,3.048 h1
  text "45" at 22.098,-4.572 h1
  text "46" at 22.098,3.048 h1
  text "43" at 19.558,-4.572 h1
  text "44" at 19.558,3.048 h1
  text "41" at 17.018,-4.144 h1
  text "42" at 17.018,3.048 h1
  text "39" at 14.478,-4.524 h1
  text "40" at 14.478,3.048 h1
  text "37" at 11.938,-4.572 h1
  text "38" at 11.938,3.048 h1
  text "35" at 9.398,-4.572 h1
  text "36" at 9.398,3.048 h1
  text "33" at 6.858,-4.572 h1
  text "34" at 6.858,3.048 h1
  text "31" at 4.318,-4.144 h1
  text "32" at 4.318,3.048 h1
  text "29" at 1.778,-4.524 h1
  text "30" at 1.778,3.048 h1
  text "27" at -0.762,-4.572 h1
  text "28" at -0.762,3.048 h1
  text "25" at -3.302,-4.572 h1
  text "26" at -3.302,3.048 h1
  text "23" at -5.842,-4.572 h1
  text "24" at -5.842,3.048 h1
  text "21" at -8.382,-4.144 h1
  text "22" at -8.382,3.048 h1
  text "19" at -10.922,-4.367 h1
  text "20" at -10.922,3.048 h1
  text "17" at -13.462,-4.415 h1
  text "18" at -13.462,3.048 h1
  text "15" at -16.002,-4.415 h1
  text "16" at -16.002,3.048 h1
  text "13" at -18.542,-4.415 h1
  text "14" at -18.542,3.048 h1
  text "11" at -21.082,-3.986 h1
  text "12" at -21.082,3.048 h1
  text "9" at -23.622,-3.634 h1
  text "10" at -23.622,3.048 h1
  text "7" at -26.162,-3.682 h1
  text "8" at -26.162,3.048 h1
  text "5" at -28.702,-3.682 h1
  text "6" at -28.702,3.048 h1
  text "3" at -31.242,-3.682 h1
  text "4" at -31.242,3.048 h1
  text "1" at -33.782,-3.253 h1
  text "2" at -33.782,3.048 h1
  text "2" at -33.782,3.048 h1
  text "1" at -33.782,-3.253 h1
3D body "PIN.STEP": height 8.43, standoff -2.49, extent 33.02,-2.54 35.56,0
3D body "PIN.STEP": height 8.43, standoff -2.49, extent 33.02,0 35.56,2.54
3D body "PIN.STEP": height 8.43, standoff -2.49, extent -35.56,0 -33.02,2.54
3D body "PIN_mid.STEP": height 8.43, standoff -2.49, extent 30.48,-2.54 33.02,0
3D body "PIN_mid.STEP": height 8.43, standoff -2.49, extent 27.94,-2.54 30.48,0
3D body "PIN_mid.STEP": height 8.43, standoff -2.49, extent 25.4,-2.54 27.94,0
3D body "PIN_mid.STEP": height 8.43, standoff -2.49, extent 22.86,-2.54 25.4,0
3D body "PIN_mid.STEP": height 8.43, standoff -2.49, extent 20.32,-2.54 22.86,0
3D body "PIN_mid.STEP": height 8.43, standoff -2.49, extent 17.78,-2.54 20.32,0
3D body "PIN_mid.STEP": height 8.43, standoff -2.49, extent 15.24,-2.54 17.78,0
3D body "PIN_mid.STEP": height 8.43, standoff -2.49, extent 12.7,-2.54 15.24,0
3D body "PIN_mid.STEP": height 8.43, standoff -2.49, extent 10.16,-2.54 12.7,0
3D body "PIN_mid.STEP": height 8.43, standoff -2.49, extent 7.62,-2.54 10.16,0
3D body "PIN_mid.STEP": height 8.43, standoff -2.49, extent 5.08,-2.54 7.62,0
3D body "PIN_mid.STEP": height 8.43, standoff -2.49, extent 2.54,-2.54 5.08,0
3D body "PIN_mid.STEP": height 8.43, standoff -2.49, extent 0,-2.54 2.54,0
3D body "PIN_mid.STEP": height 8.43, standoff -2.49, extent -2.54,-2.54 0,0
3D body "PIN_mid.STEP": height 8.43, standoff -2.49, extent -5.08,-2.54 -2.54,0
3D body "PIN_mid.STEP": height 8.43, standoff -2.49, extent -7.62,-2.54 -5.08,0
3D body "PIN_mid.STEP": height 8.43, standoff -2.49, extent -10.16,-2.54 -7.62,0
3D body "PIN_mid.STEP": height 8.43, standoff -2.49, extent -12.7,-2.54 -10.16,0
3D body "PIN_mid.STEP": height 8.43, standoff -2.49, extent -15.24,-2.54 -12.7,0
3D body "PIN_mid.STEP": height 8.43, standoff -2.49, extent -17.78,-2.54 -15.24,0
3D body "PIN_mid.STEP": height 8.43, standoff -2.49, extent -20.32,-2.54 -17.78,0
3D body "PIN_mid.STEP": height 8.43, standoff -2.49, extent -22.86,-2.54 -20.32,0
3D body "PIN_mid.STEP": height 8.43, standoff -2.49, extent -25.4,-2.54 -22.86,0
3D body "PIN_mid.STEP": height 8.43, standoff -2.49, extent -27.94,-2.54 -25.4,0
3D body "PIN_mid.STEP": height 8.43, standoff -2.49, extent -30.48,-2.54 -27.94,0
3D body "PIN_mid.STEP": height 8.43, standoff -2.49, extent -33.02,-2.54 -30.48,0
3D body "PIN_mid.STEP": height 8.43, standoff -2.49, extent -33.02,0 -30.48,2.54
3D body "PIN_mid.STEP": height 8.43, standoff -2.49, extent 30.48,0 33.02,2.54
3D body "PIN_mid.STEP": height 8.43, standoff -2.49, extent 27.94,0 30.48,2.54
3D body "PIN_mid.STEP": height 8.43, standoff -2.49, extent 25.4,0 27.94,2.54
3D body "PIN_mid.STEP": height 8.43, standoff -2.49, extent 22.86,0 25.4,2.54
3D body "PIN_mid.STEP": height 8.43, standoff -2.49, extent 20.32,0 22.86,2.54
3D body "PIN_mid.STEP": height 8.43, standoff -2.49, extent 17.78,0 20.32,2.54
3D body "PIN_mid.STEP": height 8.43, standoff -2.49, extent 15.24,0 17.78,2.54
3D body "PIN_mid.STEP": height 8.43, standoff -2.49, extent 12.7,0 15.24,2.54
3D body "PIN_mid.STEP": height 8.43, standoff -2.49, extent 10.16,0 12.7,2.54
3D body "PIN_mid.STEP": height 8.43, standoff -2.49, extent 7.62,0 10.16,2.54
3D body "PIN_mid.STEP": height 8.43, standoff -2.49, extent 5.08,0 7.62,2.54
3D body "PIN_mid.STEP": height 8.43, standoff -2.49, extent 2.54,0 5.08,2.54
3D body "PIN_mid.STEP": height 8.43, standoff -2.49, extent 0,0 2.54,2.54
3D body "PIN_mid.STEP": height 8.43, standoff -2.49, extent -2.54,0 0,2.54
3D body "PIN_mid.STEP": height 8.43, standoff -2.49, extent -5.08,0 -2.54,2.54
3D body "PIN_mid.STEP": height 8.43, standoff -2.49, extent -7.62,0 -5.08,2.54
3D body "PIN_mid.STEP": height 8.43, standoff -2.49, extent -10.16,0 -7.62,2.54
3D body "PIN_mid.STEP": height 8.43, standoff -2.49, extent -12.7,0 -10.16,2.54
3D body "PIN_mid.STEP": height 8.43, standoff -2.49, extent -15.24,0 -12.7,2.54
3D body "PIN_mid.STEP": height 8.43, standoff -2.49, extent -17.78,0 -15.24,2.54
3D body "PIN_mid.STEP": height 8.43, standoff -2.49, extent -20.32,0 -17.78,2.54
3D body "PIN_mid.STEP": height 8.43, standoff -2.49, extent -22.86,0 -20.32,2.54
3D body "PIN_mid.STEP": height 8.43, standoff -2.49, extent -25.4,0 -22.86,2.54
3D body "PIN_mid.STEP": height 8.43, standoff -2.49, extent -27.94,0 -25.4,2.54
3D body "PIN_mid.STEP": height 8.43, standoff -2.49, extent -30.48,0 -27.94,2.54
3D body "PIN.STEP": height 8.43, standoff -2.49, extent -35.56,-2.54 -33.02,0

## HDR_M_2X30 [mm] "Male Header 2X30 with 2.54 mm Pitch"
pads (60):
  round 1.4 / inner round 1.4 / far side oval 1.4x2.2 hole 1: 1(-36.83,-1.27) 2(-36.83,1.27) 3(-34.29,-1.27) 4(-34.29,1.27) 5(-31.75,-1.27) 6(-31.75,1.27) 7(-29.21,-1.27) 8(-29.21,1.27) 9(-26.67,-1.27) 10(-26.67,1.27) 11(-24.13,-1.27) 12(-24.13,1.27) 13(-21.59,-1.27) 14(-21.59,1.27) 15(-19.05,-1.27) 16(-19.05,1.27) 17(-16.51,-1.27) 18(-16.51,1.27) 19(-13.97,-1.27) 20(-13.97,1.27) 21(-11.43,-1.27) 22(-11.43,1.27) 23(-8.89,-1.27) 24(-8.89,1.27) 25(-6.35,-1.27) 26(-6.35,1.27) 27(-3.81,-1.27) 28(-3.81,1.27) 29(-1.27,-1.27) 30(-1.27,1.27) 31(1.27,-1.27) 32(1.27,1.27) 33(3.81,-1.27) 34(3.81,1.27) 35(6.35,-1.27) 36(6.35,1.27) 37(8.89,-1.27) 38(8.89,1.27) 39(11.43,-1.27) 40(11.43,1.27) 41(13.97,-1.27) 42(13.97,1.27) 43(16.51,-1.27) 44(16.51,1.27) 45(19.05,-1.27) 46(19.05,1.27) 47(21.59,-1.27) 48(21.59,1.27) 49(24.13,-1.27) 50(24.13,1.27) 51(26.67,-1.27) 52(26.67,1.27) 53(29.21,-1.27) 54(29.21,1.27) 55(31.75,-1.27) 56(31.75,1.27) 57(34.29,-1.27) 58(34.29,1.27) 59(36.83,-1.27) 60(36.83,1.27)
TopOverlay:
  drawing of 212 lines, arcs and shapes, not listed
  text "1" at -36.322,-3.253 h1
  text "2" at -36.322,3.048 h1
  text "2" at -36.322,3.048 h1
  text "1" at -36.322,-3.253 h1
  text "4" at -33.782,3.048 h1
  text "3" at -33.782,-3.682 h1
  text "6" at -31.242,3.048 h1
  text "5" at -31.242,-3.682 h1
  text "8" at -28.702,3.048 h1
  text "7" at -28.702,-3.682 h1
  text "10" at -26.162,3.048 h1
  text "9" at -26.162,-3.634 h1
  text "12" at -23.622,3.048 h1
  text "11" at -23.622,-3.986 h1
  text "14" at -21.082,3.048 h1
  text "13" at -21.082,-4.415 h1
  text "16" at -18.542,3.048 h1
  text "15" at -18.542,-4.415 h1
  text "18" at -16.002,3.048 h1
  text "17" at -16.002,-4.415 h1
  text "20" at -13.462,3.048 h1
  text "19" at -13.462,-4.367 h1
  text "22" at -10.922,3.048 h1
  text "21" at -10.922,-4.144 h1
  text "24" at -8.382,3.048 h1
  text "23" at -8.382,-4.572 h1
  text "26" at -5.842,3.048 h1
  text "25" at -5.842,-4.572 h1
  text "28" at -3.302,3.048 h1
  text "27" at -3.302,-4.572 h1
  text "30" at -0.762,3.048 h1
  text "29" at -0.762,-4.524 h1
  text "32" at 1.778,3.048 h1
  text "31" at 1.778,-4.144 h1
  text "34" at 4.318,3.048 h1
  text "33" at 4.318,-4.572 h1
  text "36" at 6.858,3.048 h1
  text "35" at 6.858,-4.572 h1
  text "38" at 9.398,3.048 h1
  text "37" at 9.398,-4.572 h1
  text "40" at 11.938,3.048 h1
  text "39" at 11.938,-4.524 h1
  text "42" at 14.478,3.048 h1
  text "41" at 14.478,-4.144 h1
  text "44" at 17.018,3.048 h1
  text "43" at 17.018,-4.572 h1
  text "46" at 19.558,3.048 h1
  text "45" at 19.558,-4.572 h1
  text "48" at 22.098,3.048 h1
  text "47" at 22.098,-4.572 h1
  text "50" at 24.638,3.048 h1
  text "49" at 24.638,-4.524 h1
  text "52" at 27.178,3.048 h1
  text "51" at 27.178,-4.144 h1
  text "54" at 29.718,3.048 h1
  text "53" at 29.718,-4.572 h1
  text "56" at 32.258,3.048 h1
  text "55" at 32.258,-4.572 h1
  text "58" at 34.798,3.048 h1
  text "57" at 34.798,-4.572 h1
  text "60" at 37.338,3.048 h1
  text "59" at 37.338,-4.524 h1
3D body "PIN.STEP": height 8.43, standoff -2.49, extent -38.1,-2.54 -35.56,0
3D body "PIN_mid.STEP": height 8.43, standoff -2.49, extent -33.02,0 -30.48,2.54
3D body "PIN_mid.STEP": height 8.43, standoff -2.49, extent -30.48,0 -27.94,2.54
3D body "PIN_mid.STEP": height 8.43, standoff -2.49, extent -27.94,0 -25.4,2.54
3D body "PIN_mid.STEP": height 8.43, standoff -2.49, extent -25.4,0 -22.86,2.54
3D body "PIN_mid.STEP": height 8.43, standoff -2.49, extent -22.86,0 -20.32,2.54
3D body "PIN_mid.STEP": height 8.43, standoff -2.49, extent -20.32,0 -17.78,2.54
3D body "PIN_mid.STEP": height 8.43, standoff -2.49, extent -17.78,0 -15.24,2.54
3D body "PIN_mid.STEP": height 8.43, standoff -2.49, extent -15.24,0 -12.7,2.54
3D body "PIN_mid.STEP": height 8.43, standoff -2.49, extent -12.7,0 -10.16,2.54
3D body "PIN_mid.STEP": height 8.43, standoff -2.49, extent -10.16,0 -7.62,2.54
3D body "PIN_mid.STEP": height 8.43, standoff -2.49, extent -7.62,0 -5.08,2.54
3D body "PIN_mid.STEP": height 8.43, standoff -2.49, extent -5.08,0 -2.54,2.54
3D body "PIN_mid.STEP": height 8.43, standoff -2.49, extent -2.54,0 0,2.54
3D body "PIN_mid.STEP": height 8.43, standoff -2.49, extent 0,0 2.54,2.54
3D body "PIN_mid.STEP": height 8.43, standoff -2.49, extent 2.54,0 5.08,2.54
3D body "PIN_mid.STEP": height 8.43, standoff -2.49, extent 5.08,0 7.62,2.54
3D body "PIN_mid.STEP": height 8.43, standoff -2.49, extent 7.62,0 10.16,2.54
3D body "PIN_mid.STEP": height 8.43, standoff -2.49, extent 10.16,0 12.7,2.54
3D body "PIN_mid.STEP": height 8.43, standoff -2.49, extent 12.7,0 15.24,2.54
3D body "PIN_mid.STEP": height 8.43, standoff -2.49, extent 15.24,0 17.78,2.54
3D body "PIN_mid.STEP": height 8.43, standoff -2.49, extent 17.78,0 20.32,2.54
3D body "PIN_mid.STEP": height 8.43, standoff -2.49, extent 20.32,0 22.86,2.54
3D body "PIN_mid.STEP": height 8.43, standoff -2.49, extent 22.86,0 25.4,2.54
3D body "PIN_mid.STEP": height 8.43, standoff -2.49, extent 25.4,0 27.94,2.54
3D body "PIN_mid.STEP": height 8.43, standoff -2.49, extent 27.94,0 30.48,2.54
3D body "PIN_mid.STEP": height 8.43, standoff -2.49, extent 30.48,0 33.02,2.54
3D body "PIN_mid.STEP": height 8.43, standoff -2.49, extent 33.02,0 35.56,2.54
3D body "PIN_mid.STEP": height 8.43, standoff -2.49, extent -35.56,0 -33.02,2.54
3D body "PIN_mid.STEP": height 8.43, standoff -2.49, extent -35.56,-2.54 -33.02,0
3D body "PIN_mid.STEP": height 8.43, standoff -2.49, extent -33.02,-2.54 -30.48,0
3D body "PIN_mid.STEP": height 8.43, standoff -2.49, extent -30.48,-2.54 -27.94,0
3D body "PIN_mid.STEP": height 8.43, standoff -2.49, extent -27.94,-2.54 -25.4,0
3D body "PIN_mid.STEP": height 8.43, standoff -2.49, extent -25.4,-2.54 -22.86,0
3D body "PIN_mid.STEP": height 8.43, standoff -2.49, extent -22.86,-2.54 -20.32,0
3D body "PIN_mid.STEP": height 8.43, standoff -2.49, extent -20.32,-2.54 -17.78,0
3D body "PIN_mid.STEP": height 8.43, standoff -2.49, extent -17.78,-2.54 -15.24,0
3D body "PIN_mid.STEP": height 8.43, standoff -2.49, extent -15.24,-2.54 -12.7,0
3D body "PIN_mid.STEP": height 8.43, standoff -2.49, extent -12.7,-2.54 -10.16,0
3D body "PIN_mid.STEP": height 8.43, standoff -2.49, extent -10.16,-2.54 -7.62,0
3D body "PIN_mid.STEP": height 8.43, standoff -2.49, extent -7.62,-2.54 -5.08,0
3D body "PIN_mid.STEP": height 8.43, standoff -2.49, extent -5.08,-2.54 -2.54,0
3D body "PIN_mid.STEP": height 8.43, standoff -2.49, extent -2.54,-2.54 0,0
3D body "PIN_mid.STEP": height 8.43, standoff -2.49, extent 0,-2.54 2.54,0
3D body "PIN_mid.STEP": height 8.43, standoff -2.49, extent 2.54,-2.54 5.08,0
3D body "PIN_mid.STEP": height 8.43, standoff -2.49, extent 5.08,-2.54 7.62,0
3D body "PIN_mid.STEP": height 8.43, standoff -2.49, extent 7.62,-2.54 10.16,0
3D body "PIN_mid.STEP": height 8.43, standoff -2.49, extent 10.16,-2.54 12.7,0
3D body "PIN_mid.STEP": height 8.43, standoff -2.49, extent 12.7,-2.54 15.24,0
3D body "PIN_mid.STEP": height 8.43, standoff -2.49, extent 15.24,-2.54 17.78,0
3D body "PIN_mid.STEP": height 8.43, standoff -2.49, extent 17.78,-2.54 20.32,0
3D body "PIN_mid.STEP": height 8.43, standoff -2.49, extent 20.32,-2.54 22.86,0
3D body "PIN_mid.STEP": height 8.43, standoff -2.49, extent 22.86,-2.54 25.4,0
3D body "PIN_mid.STEP": height 8.43, standoff -2.49, extent 25.4,-2.54 27.94,0
3D body "PIN_mid.STEP": height 8.43, standoff -2.49, extent 27.94,-2.54 30.48,0
3D body "PIN_mid.STEP": height 8.43, standoff -2.49, extent 30.48,-2.54 33.02,0
3D body "PIN_mid.STEP": height 8.43, standoff -2.49, extent 33.02,-2.54 35.56,0
3D body "PIN.STEP": height 8.43, standoff -2.49, extent -38.1,0 -35.56,2.54
3D body "PIN.STEP": height 8.43, standoff -2.49, extent 35.56,0 38.1,2.54
3D body "PIN.STEP": height 8.43, standoff -2.49, extent 35.56,-2.54 38.1,0